# Altium footprint library 445I23D25M00000.PcbLib: 3 footprints
Each footprint in its own frame and in the unit in brackets; x right, y up, seen from the top. Pads: shape width x height; smd on the part's side, far side on the other; paste and mask are expansions set on the pad; w line width, h text height; cw(c..) or ccw(c..) is an arc to the next point about the centre after c.
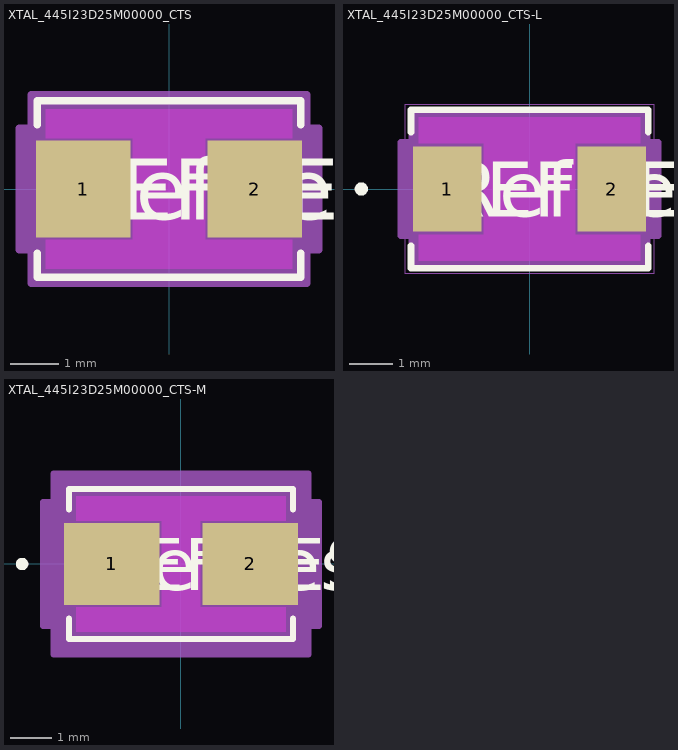
[diagram p0: the footprints below, top view; thin cyan lines are the x and y axes]

## XTAL_445I23D25M00000_CTS [mil]
pads (2):
  rect 77x79 smd paste+0 mask+0: 1(-70,0) 2(70,0)
Top Layer keep-out:
  region: -29.5,-41.5 -29.5,41.5 29.5,41.5 29.5,-41.5
  region: -100.5,41.5 -100.5,65 100.5,65 100.5,41.5
  region: -100.5,-65 -100.5,-41.5 100.5,-41.5 100.5,-65
Top Overlay:
  lines w6: -107.5,-52.6 -107.5,-72 107.5,-72 107.5,-52.6 ; -107.5,52.6 -107.5,72 107.5,72 107.5,52.6
  text "RefDes" at -75,-25 h50
  text "REFDES" at -87.5,-25 h50
Keep-Out Layer:
  region: -29.5,-41.5 -29.5,41.5 29.5,41.5 29.5,-41.5
Mechanical 13:
  lines w1: -112.5,-77 -112.5,77 112.5,77 112.5,-77 -112.5,-77 ; -102.5,-67 102.5,-67 102.5,67 -102.5,67 -102.5,-67
  text "RefDes2" at -87.5,-25 h50
Mechanical 15:
  region: -112.5,-49.5 -122.5,-49.5 -122.5,49.5 -112.5,49.5 -112.5,77 112.5,77 112.5,49.5 122.5,49.5 122.5,-49.5 112.5,-49.5 112.5,-77 -112.5,-77
  lines w6: -122.5,-49.5 -122.5,49.5 -112.5,49.5 -112.5,77 112.5,77 112.5,49.5 122.5,49.5 122.5,-49.5 112.5,-49.5 112.5,-77 -112.5,-77 -112.5,-49.5 -122.5,-49.5
3D body "XTAL_445I23D25M00000_CTS.step": height 52.99, standoff 0, extent -112.76,-82.24 112.76,82.24

## XTAL_445I23D25M00000_CTS-L [mil]
pads (2):
  rect 62x77 smd paste+0 mask+0: 1(-74.5,0) 2(74.5,0)
Top Layer keep-out:
  region: -41.5,-41.5 -41.5,41.5 41.5,41.5 41.5,-41.5
  region: -100.5,41.5 -100.5,65 100.5,65 100.5,41.5
  region: -100.5,-65 -100.5,-41.5 100.5,-41.5 100.5,-65
Top Overlay:
  circle w6: c-152.5,0 r3
  lines w6: -107.5,-51.45 -107.5,-72 107.5,-72 107.5,-51.45 ; -107.5,51.45 -107.5,72 107.5,72 107.5,51.45
  text "RefDes" at -75,-25 h50
  text "REFDES" at -87.5,-25 h50
Keep-Out Layer:
  region: -41.5,-41.5 -41.5,41.5 41.5,41.5 41.5,-41.5
Mechanical 13:
  circle w0: c-82.5,0 r3
  lines w1: -112.5,-77 -112.5,77 112.5,77 112.5,-77 -112.5,-77 ; -102.5,-67 102.5,-67 102.5,67 -102.5,67 -102.5,-67
  text "RefDes2" at -87.5,-25 h50
Mechanical 15:
  region: -106.5,-42.5 -116.5,-42.5 -116.5,42.5 -106.5,42.5 -106.5,71 106.5,71 106.5,42.5 116.5,42.5 116.5,-42.5 106.5,-42.5 106.5,-71 -106.5,-71
  lines w6: -116.5,-42.5 -116.5,42.5 -106.5,42.5 -106.5,71 106.5,71 106.5,42.5 116.5,42.5 116.5,-42.5 106.5,-42.5 106.5,-71 -106.5,-71 -106.5,-42.5 -116.5,-42.5
3D body "XTAL_445I23D25M00000_CTS.step": height 52.99, standoff 0, extent -112.76,-82.24 112.76,82.24

## XTAL_445I23D25M00000_CTS-M [mil]
pads (2):
  rect 92x79 smd paste+0 mask+0: 1(-66.5,0) 2(66.5,0)
Top Layer keep-out:
  region: -18.5,-41.5 -18.5,41.5 18.5,41.5 18.5,-41.5
  region: -100.5,41.5 -100.5,65 100.5,65 100.5,41.5
  region: -100.5,-65 -100.5,-41.5 100.5,-41.5 100.5,-65
Top Overlay:
  circle w6: c-152.5,0 r3
  lines w6: -107.5,-52.6 -107.5,-72 107.5,-72 107.5,-52.6 ; -107.5,52.6 -107.5,72 107.5,72 107.5,52.6
  text "RefDes" at -75,-25 h50
  text "REFDES" at -87.5,-25 h50
Keep-Out Layer:
  region: -18.5,-41.5 -18.5,41.5 18.5,41.5 18.5,-41.5
Mechanical 13:
  circle w0: c-82.5,0 r3
  lines w1: -112.5,-77 -112.5,77 112.5,77 112.5,-77 -112.5,-77 ; -102.5,-67 102.5,-67 102.5,67 -102.5,67 -102.5,-67
  text "RefDes2" at -87.5,-25 h50
Mechanical 15:
  region: -122.5,-59.5 -132.5,-59.5 -132.5,59.5 -122.5,59.5 -122.5,87 122.5,87 122.5,59.5 132.5,59.5 132.5,-59.5 122.5,-59.5 122.5,-87 -122.5,-87
  lines w6: -132.5,-59.5 -132.5,59.5 -122.5,59.5 -122.5,87 122.5,87 122.5,59.5 132.5,59.5 132.5,-59.5 122.5,-59.5 122.5,-87 -122.5,-87 -122.5,-59.5 -132.5,-59.5
3D body "XTAL_445I23D25M00000_CTS.step": height 52.99, standoff 0, extent -112.76,-82.24 112.76,82.24